# Altium footprint library DRV8876PWPR.PcbLib: 4 footprints
Each footprint in its own frame and in the unit in brackets; x right, y up, seen from the top. Pads: shape width x height; smd on the part's side, far side on the other; paste and mask are expansions set on the pad; w line width, h text height; cw(c..) or ccw(c..) is an arc to the next point about the centre after c.
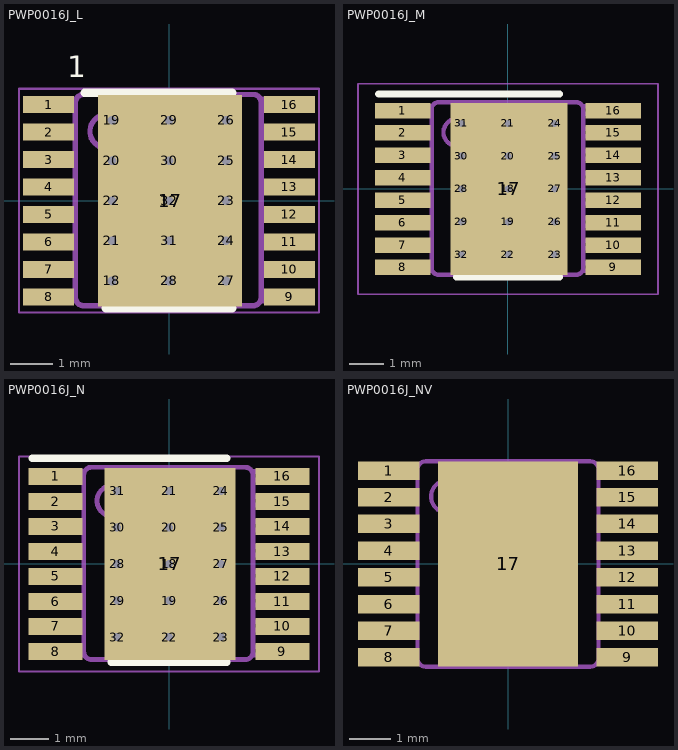
[diagram p0: the footprints below, top view; thin cyan lines are the x and y axes]

## PWP0016J_L [mm]
pads (32):
  rect 1.2x0.4 smd paste+0 mask+0: 1(-2.85,2.275) 2(-2.85,1.625) 3(-2.85,0.975) 4(-2.85,0.325) 5(-2.85,-0.325) 6(-2.85,-0.975) 7(-2.85,-1.625) 8(-2.85,-2.275) 9(2.85,-2.275) 10(2.85,-1.625) 11(2.85,-0.975) 12(2.85,-0.325) 13(2.85,0.325) 14(2.85,0.975) 15(2.85,1.625) 16(2.85,2.275)
  rect 3.4x5 smd paste-1.7 mask-1.702: 17(0.025,0)
  round 0.5 hole 0.203 paste-2539.97 mask+0: 18(-1.35,-1.9) 19(-1.35,1.9) 20(-1.35,0.95) 21(-1.35,-0.95) 22(-1.35,0) 23(1.35,0) 24(1.35,-0.95) 25(1.35,0.95) 26(1.35,1.9) 27(1.35,-1.9) 28(0,-1.9) 29(0,1.9) 30(0,0.95) 31(0,-0.95) 32(0,0)
Top Overlay:
  lines w0.2: -2,2.55 1.5,2.55 ; -1.5,-2.55 1.5,-2.55
  text "1" at -2.413,2.921 h0.51
Top Paste:
  region: -1.229,-1.735 -1.23,-1.726 -1.23,1.726 -1.229,1.735 -1.226,1.745 -1.222,1.753 -1.216,1.761 -1.208,1.767 -1.2,1.771 -1.19,1.774 -1.181,1.775 1.181,1.775 1.19,1.774 1.2,1.771 1.208,1.767 1.216,1.761 1.222,1.753 1.226,1.745 1.229,1.735 1.23,1.726 1.23,-1.726 1.229,-1.735 1.226,-1.745 1.222,-1.753 1.216,-1.761 1.208,-1.767 1.2,-1.771 1.19,-1.774 1.181,-1.775 -1.181,-1.775 -1.19,-1.774 -1.2,-1.771 -1.208,-1.767 -1.216,-1.761 -1.222,-1.753 -1.226,-1.745
Top Solder:
  region: -1.229,-1.735 -1.23,-1.726 -1.23,1.726 -1.229,1.735 -1.226,1.745 -1.222,1.753 -1.216,1.761 -1.208,1.767 -1.2,1.771 -1.19,1.774 -1.181,1.775 1.181,1.775 1.19,1.774 1.2,1.771 1.208,1.767 1.216,1.761 1.222,1.753 1.226,1.745 1.229,1.735 1.23,1.726 1.23,-1.726 1.229,-1.735 1.226,-1.745 1.222,-1.753 1.216,-1.761 1.208,-1.767 1.2,-1.771 1.19,-1.774 1.181,-1.775 -1.181,-1.775 -1.19,-1.774 -1.2,-1.771 -1.208,-1.767 -1.216,-1.761 -1.222,-1.753 -1.226,-1.745
Mechanical 13:
  drawing of 202 lines, arcs and shapes, not listed
Mechanical 15:
  lines w0.05: -3.55,-2.65 3.55,-2.65 3.55,2.65 -3.55,2.65 -3.55,-2.65
  lines w0.1: -0.5,0 0.5,0 ; 0,-0.5 0,0.5
3D body "PWP0016C.stp": height 1.13, standoff 0, extent -3.2,-2.5 3.2,2.5

## PWP0016J_M [mm]
pads (32):
  rect 1.6x0.45 smd paste+0 mask+0: 1(-3.05,2.275) 2(-3.05,1.625) 3(-3.05,0.975) 4(-3.05,0.325) 5(-3.05,-0.325) 6(-3.05,-0.975) 7(-3.05,-1.625) 8(-3.05,-2.275) 9(3.05,-2.275) 10(3.05,-1.625) 11(3.05,-0.975) 12(3.05,-0.325) 13(3.05,0.325) 14(3.05,0.975) 15(3.05,1.625) 16(3.05,2.275)
  rect 3.4x5 smd paste-1.7 mask-1.702: 17(0.025,0)
  round 0.5 hole 0.203 paste-2539.97 mask+0: 18(0,0) 19(0,-0.95) 20(0,0.95) 21(0,1.9) 22(0,-1.9) 23(1.35,-1.9) 24(1.35,1.9) 25(1.35,0.95) 26(1.35,-0.95) 27(1.35,0) 28(-1.35,0) 29(-1.35,-0.95) 30(-1.35,0.95) 31(-1.35,1.9) 32(-1.35,-1.9)
Top Overlay:
  lines w0.2: -3.75,2.75 1.5,2.75 ; -1.5,-2.55 1.5,-2.55
  text ".Designator" at -3.492,-0.635 h1.27
Top Paste:
  region: -1.229,-1.735 -1.23,-1.726 -1.23,1.726 -1.229,1.735 -1.226,1.745 -1.222,1.753 -1.216,1.761 -1.208,1.767 -1.2,1.771 -1.19,1.774 -1.181,1.775 1.181,1.775 1.19,1.774 1.2,1.771 1.208,1.767 1.216,1.761 1.222,1.753 1.226,1.745 1.229,1.735 1.23,1.726 1.23,-1.726 1.229,-1.735 1.226,-1.745 1.222,-1.753 1.216,-1.761 1.208,-1.767 1.2,-1.771 1.19,-1.774 1.181,-1.775 -1.181,-1.775 -1.19,-1.774 -1.2,-1.771 -1.208,-1.767 -1.216,-1.761 -1.222,-1.753 -1.226,-1.745
Top Solder:
  region: -1.229,-1.735 -1.23,-1.726 -1.23,1.726 -1.229,1.735 -1.226,1.745 -1.222,1.753 -1.216,1.761 -1.208,1.767 -1.2,1.771 -1.19,1.774 -1.181,1.775 1.181,1.775 1.19,1.774 1.2,1.771 1.208,1.767 1.216,1.761 1.222,1.753 1.226,1.745 1.229,1.735 1.23,1.726 1.23,-1.726 1.229,-1.735 1.226,-1.745 1.222,-1.753 1.216,-1.761 1.208,-1.767 1.2,-1.771 1.19,-1.774 1.181,-1.775 -1.181,-1.775 -1.19,-1.774 -1.2,-1.771 -1.208,-1.767 -1.216,-1.761 -1.222,-1.753 -1.226,-1.745
Mechanical 13:
  drawing of 202 lines, arcs and shapes, not listed
  text ".Designator" at -3.492,-0.635 h1.27
Mechanical 15:
  lines w0.05: -4.35,-3.05 -4.35,3.05 4.35,3.05 4.35,-3.05 -4.35,-3.05
  lines w0.1: -0.5,0 0.5,0 ; 0,-0.5 0,0.5

## PWP0016J_N [mm]
pads (32):
  rect 1.4x0.45 smd paste+0 mask+0: 1(-2.95,2.275) 2(-2.95,1.625) 3(-2.95,0.975) 4(-2.95,0.325) 5(-2.95,-0.325) 6(-2.95,-0.975) 7(-2.95,-1.625) 8(-2.95,-2.275) 9(2.95,-2.275) 10(2.95,-1.625) 11(2.95,-0.975) 12(2.95,-0.325) 13(2.95,0.325) 14(2.95,0.975) 15(2.95,1.625) 16(2.95,2.275)
  rect 3.4x5 smd paste-1.7 mask-1.702: 17(0.025,0)
  round 0.5 hole 0.203 paste-2539.97 mask+0: 18(0,0) 19(0,-0.95) 20(0,0.95) 21(0,1.9) 22(0,-1.9) 23(1.35,-1.9) 24(1.35,1.9) 25(1.35,0.95) 26(1.35,-0.95) 27(1.35,0) 28(-1.35,0) 29(-1.35,-0.95) 30(-1.35,0.95) 31(-1.35,1.9) 32(-1.35,-1.9)
Top Overlay:
  lines w0.2: -3.55,2.75 1.5,2.75 ; -1.5,-2.55 1.5,-2.55
  text ".Designator" at -3.492,-0.635 h1.27
Top Paste:
  region: -1.229,-1.735 -1.23,-1.726 -1.23,1.726 -1.229,1.735 -1.226,1.745 -1.222,1.753 -1.216,1.761 -1.208,1.767 -1.2,1.771 -1.19,1.774 -1.181,1.775 1.181,1.775 1.19,1.774 1.2,1.771 1.208,1.767 1.216,1.761 1.222,1.753 1.226,1.745 1.229,1.735 1.23,1.726 1.23,-1.726 1.229,-1.735 1.226,-1.745 1.222,-1.753 1.216,-1.761 1.208,-1.767 1.2,-1.771 1.19,-1.774 1.181,-1.775 -1.181,-1.775 -1.19,-1.774 -1.2,-1.771 -1.208,-1.767 -1.216,-1.761 -1.222,-1.753 -1.226,-1.745
Top Solder:
  region: -1.229,-1.735 -1.23,-1.726 -1.23,1.726 -1.229,1.735 -1.226,1.745 -1.222,1.753 -1.216,1.761 -1.208,1.767 -1.2,1.771 -1.19,1.774 -1.181,1.775 1.181,1.775 1.19,1.774 1.2,1.771 1.208,1.767 1.216,1.761 1.222,1.753 1.226,1.745 1.229,1.735 1.23,1.726 1.23,-1.726 1.229,-1.735 1.226,-1.745 1.222,-1.753 1.216,-1.761 1.208,-1.767 1.2,-1.771 1.19,-1.774 1.181,-1.775 -1.181,-1.775 -1.19,-1.774 -1.2,-1.771 -1.208,-1.767 -1.216,-1.761 -1.222,-1.753 -1.226,-1.745
Mechanical 13:
  drawing of 202 lines, arcs and shapes, not listed
  text ".Designator" at -3.492,-0.635 h1.27
Mechanical 15:
  lines w0.05: -3.9,-2.8 3.9,-2.8 3.9,2.8 -3.9,2.8 -3.9,-2.8
  lines w0.1: -0.5,0 0.5,0 ; 0,-0.5 0,0.5

## PWP0016J_NV [mm]
pads (17):
  rect 1.5x0.45 smd paste+0 mask+0: 1(-2.9,2.275) 2(-2.9,1.625) 3(-2.9,0.975) 4(-2.9,0.325) 5(-2.9,-0.325) 6(-2.9,-0.975) 7(-2.9,-1.625) 8(-2.9,-2.275) 9(2.9,-2.275) 10(2.9,-1.625) 11(2.9,-0.975) 12(2.9,-0.325) 13(2.9,0.325) 14(2.9,0.975) 15(2.9,1.625) 16(2.9,2.275)
  rect 3.4x5 smd paste-1.7 mask-1.702: 17(0,0)
Top Overlay:
  text ".Designator" at -3.492,-0.635 h1.27
Top Paste:
  region: -1.229,-1.735 -1.23,-1.726 -1.23,1.726 -1.229,1.735 -1.226,1.745 -1.222,1.753 -1.216,1.761 -1.208,1.767 -1.2,1.771 -1.19,1.774 -1.181,1.775 1.181,1.775 1.19,1.774 1.2,1.771 1.208,1.767 1.216,1.761 1.222,1.753 1.226,1.745 1.229,1.735 1.23,1.726 1.23,-1.726 1.229,-1.735 1.226,-1.745 1.222,-1.753 1.216,-1.761 1.208,-1.767 1.2,-1.771 1.19,-1.774 1.181,-1.775 -1.181,-1.775 -1.19,-1.774 -1.2,-1.771 -1.208,-1.767 -1.216,-1.761 -1.222,-1.753 -1.226,-1.745
Top Solder:
  region: -1.229,-1.735 -1.23,-1.726 -1.23,1.726 -1.229,1.735 -1.226,1.745 -1.222,1.753 -1.216,1.761 -1.208,1.767 -1.2,1.771 -1.19,1.774 -1.181,1.775 1.181,1.775 1.19,1.774 1.2,1.771 1.208,1.767 1.216,1.761 1.222,1.753 1.226,1.745 1.229,1.735 1.23,1.726 1.23,-1.726 1.229,-1.735 1.226,-1.745 1.222,-1.753 1.216,-1.761 1.208,-1.767 1.2,-1.771 1.19,-1.774 1.181,-1.775 -1.181,-1.775 -1.19,-1.774 -1.2,-1.771 -1.208,-1.767 -1.216,-1.761 -1.222,-1.753 -1.226,-1.745
Mechanical 13:
  lines w0.1: -2.216,-2.37 -3.2,-2.37 -3.2,-2.15 -2.216,-2.15 ; -2.216,-1.72 -3.2,-1.72 -3.2,-1.5 -2.216,-1.5 ; -2.216,-1.07 -3.2,-1.07 -3.2,-0.85 -2.216,-0.85 ; -2.216,-0.42 -3.2,-0.42 -3.2,-0.2 -2.216,-0.2 ; -2.216,0.235 -3.2,0.235 -3.2,0.455 -2.216,0.455 ; -2.216,0.88 -3.2,0.88 -3.2,1.1 -2.216,1.1 ; -2.216,1.53 -3.2,1.53 -3.2,1.75 -2.216,1.75 ; -2.216,2.18 -3.2,2.18 -3.2,2.4 -2.216,2.4 ; 2.216,-2.37 3.2,-2.37 3.2,-2.15 2.216,-2.15 ; 2.216,-1.72 3.2,-1.72 3.2,-1.5 2.216,-1.5 ; 2.216,-1.07 3.2,-1.07 3.2,-0.85 2.216,-0.85 ; 2.216,-0.42 3.2,-0.42 3.2,-0.2 2.216,-0.2 ; 2.216,0.235 3.2,0.235 3.2,0.455 2.216,0.455 ; 2.216,0.88 3.2,0.88 3.2,1.1 2.216,1.1 ; 2.216,1.53 3.2,1.53 3.2,1.75 2.216,1.75 ; 2.216,2.18 3.2,2.18 3.2,2.4 2.216,2.4 ; -2.2,-2.3 -2.2,2.3 cw(c-2,2.3) -2,2.5 2,2.5 cw(c2,2.3) 2.2,2.3 2.2,-2.3 cw(c2,-2.3) 2,-2.5 -2,-2.5 cw(c-2,-2.3) -2.2,-2.3 ; -1.47,1.242 cw(c-1.47,1.642) -1.47,2.042 cw(c-1.47,1.642) -1.47,1.242
  text ".Designator" at -3.492,-0.635 h1.27